# Altium footprint library ESP.PcbLib: 10 footprints
Each footprint in its own frame and in the unit in brackets; x right, y up, seen from the top. Pads: shape width x height; smd on the part's side, far side on the other; paste and mask are expansions set on the pad; w line width, h text height; cw(c..) or ccw(c..) is an arc to the next point about the centre after c.
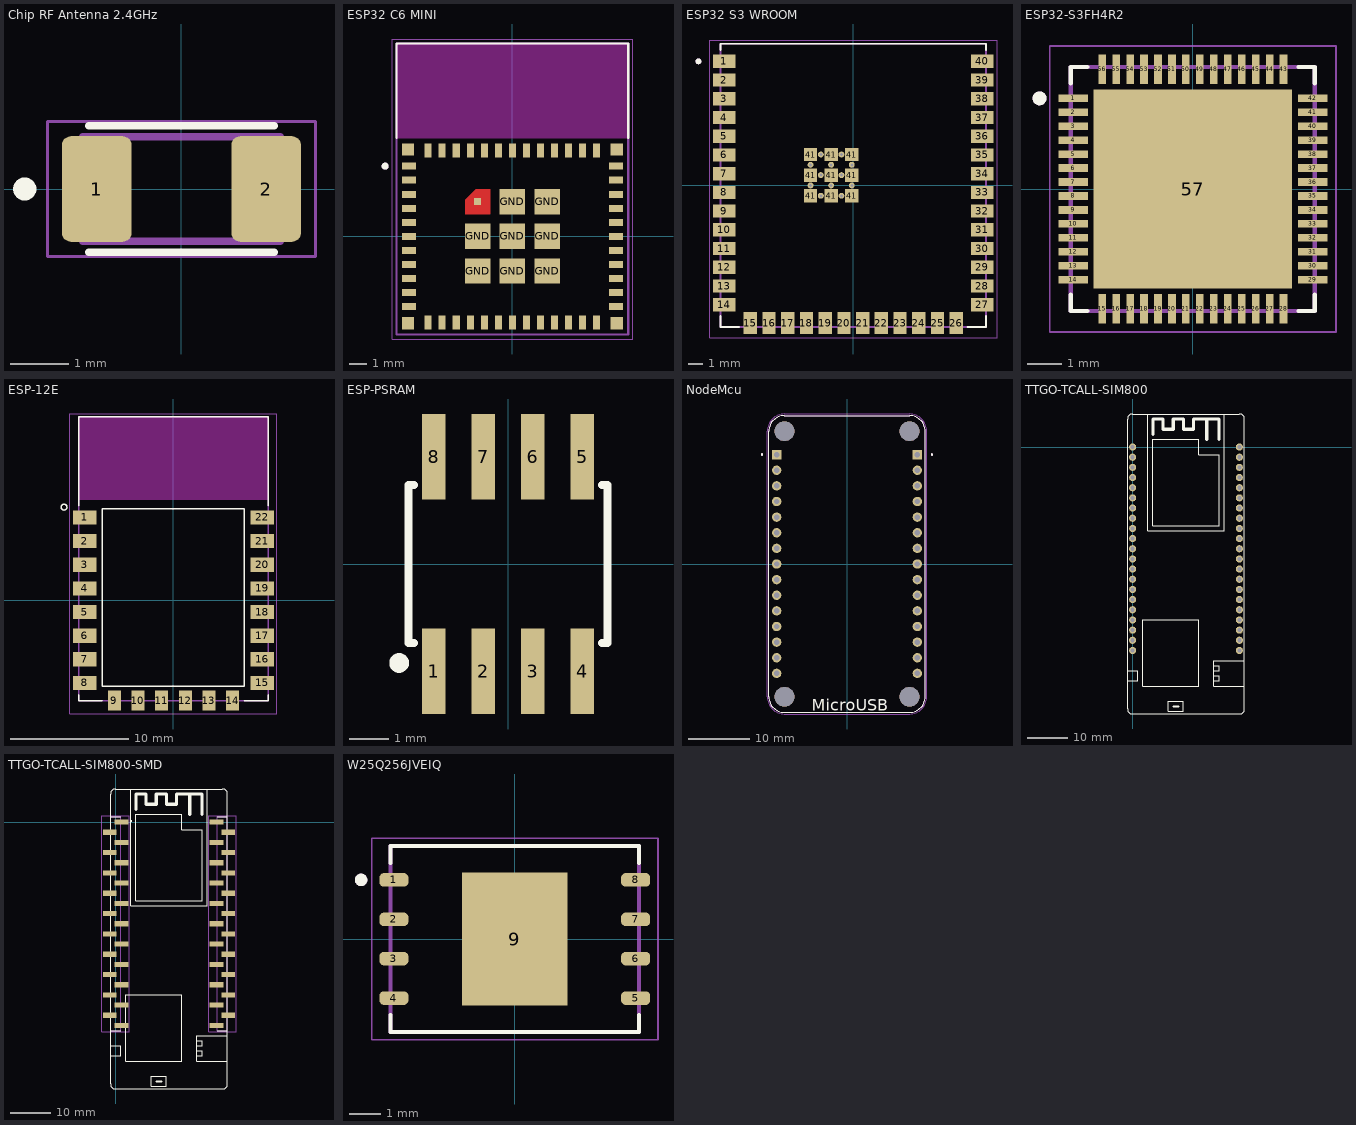
[diagram p0: the footprints below, top view; thin cyan lines are the x and y axes]

## Chip RF Antenna 2.4GHz [mm] "ANTC3216X140N"
pads (2):
  rrect25% 1.2x1.82 smd: 1(-1.46,0) 2(1.46,0)
Top Overlay:
  circle w0.2: c-2.7,0 r0.1
  lines w0.127: -1.6,-1.09 1.6,-1.09 ; -1.6,1.09 1.6,1.09
Mechanical 13:
  lines w0.127: -1.7,-0.9 1.7,-0.9 1.7,0.9 -1.7,0.9 -1.7,-0.9
Mechanical 15:
  lines w0.05: -2.31,-1.16 2.31,-1.16 2.31,1.16 -2.31,1.16 -2.31,-1.16
3D body "step_temp.STEP": height 1.4, standoff 0, extent -1.6,-0.8 1.6,0.8

## ESP32 C6 MINI [mm] "ESP32-C6-MINI-1-N4"
height 2.55
pads (61):
  rect 0.8x0.4 smd: 3(-5.9,2.4) 5(-5.9,0.8) 6(-5.9,0) 8(-5.9,-1.6) 9(-5.9,-2.4) 10(-5.9,-3.2) 25(5.9,-4) 26(5.9,-3.2) 27(5.9,-2.4) 28(5.9,-1.6) 29(5.9,-0.8) 30(5.9,0) 31(5.9,0.8) GND(-5.9,-4) GND(-5.9,3.2) GND(-5.9,4) NC(-5.9,-0.8) NC(-5.9,1.6) NC(5.9,1.6) NC(5.9,2.4) NC(5.9,3.2) NC(5.9,4)
  rect 0.4x0.8 smd: 12(-4.8,-4.9) 13(-4,-4.9) 15(-2.4,-4.9) 16(-1.6,-4.9) 17(-0.8,-4.9) 18(0,-4.9) 19(0.8,-4.9) 20(1.6,-4.9) 22(3.2,-4.9) 23(4,-4.9) 24(4.8,-4.9) GND(-4.8,4.9) GND(-4,4.9) GND(-3.2,-4.9) GND(-3.2,4.9) GND(-2.4,4.9) GND(-1.6,4.9) GND(-0.8,4.9) GND(0,4.9) GND(0.8,4.9) GND(1.6,4.9) GND(2.4,4.9) GND(3.2,4.9) GND(4,4.9) GND(4.8,4.9) NC(2.4,-4.9)
  rect 0.7x0.7 smd: GND(-5.95,-4.95) GND(-5.95,4.95) GND(5.95,-4.95) GND(5.95,4.95)
  rect 1.45x1.45 smd: GND(-1.975,-1.975) GND(-1.975,0) GND(0,-1.975) GND(0,0) GND(0,1.975) GND(1.975,-1.975) GND(1.975,0) GND(1.975,1.975)
  rect 0.4x0.4 smd paste-1 mask+0: GND(-1.975,1.975)
Top Layer:
  region: -1.25,1.25 -2.7,1.25 -2.7,2.1 -2.1,2.7 -1.25,2.7
Top Overlay:
  circle w0.2: c-7.25,4 r0.1
  lines w0.127: -6.6,5.62 -6.6,11 6.6,11 6.6,5.62
Top Paste:
  region: -1.25,1.25 -2.7,1.25 -2.7,2.1 -2.1,2.7 -1.25,2.7
Top Solder:
  region: -1.15,1.15 -2.8,1.15 -2.8,2.15 -2.15,2.8 -1.15,2.8
Keep-Out Layer:
  region: 6.6,5.6 -6.6,5.6 -6.6,11 6.6,11
Mechanical 13:
  circle w0.2: c-7.25,4 r0.1
  lines w0.127: -6.6,-5.6 -6.6,11 6.6,11 6.6,-5.6 -6.6,-5.6
Mechanical 15:
  lines w0.05: -6.85,-5.85 6.85,-5.85 6.85,11.25 -6.85,11.25 -6.85,-5.85
3D body "ESP32-C6-MINI-1-N4.STEP": height 2.55, standoff 0, extent -6.6,-5.597 6.6,11.003

## ESP32 S3 WROOM [mm] "ESP32-S3-WROOM-1U-N4"
height 3.35
pads (61):
  rect 1.5x0.9 smd: 1(-8.75,8.41) 2(-8.75,7.14) 3(-8.75,5.87) 4(-8.75,4.6) 5(-8.75,3.33) 6(-8.75,2.06) 7(-8.75,0.79) 8(-8.75,-0.48) 9(-8.75,-1.75) 10(-8.75,-3.02) 11(-8.75,-4.29) 12(-8.75,-5.56) 13(-8.75,-6.83) 14(-8.75,-8.1) 27(8.75,-8.1) 28(8.75,-6.83) 29(8.75,-5.56) 30(8.75,-4.29) 31(8.75,-3.02) 32(8.75,-1.75) 33(8.75,-0.48) 34(8.75,0.79) 35(8.75,2.06) 36(8.75,3.33) 37(8.75,4.6) 38(8.75,5.87) 39(8.75,7.14) 40(8.75,8.41)
  rect 0.9x1.5 smd: 15(-6.985,-9.35) 16(-5.715,-9.35) 17(-4.445,-9.35) 18(-3.175,-9.35) 19(-1.905,-9.35) 20(-0.635,-9.35) 21(0.635,-9.35) 22(1.905,-9.35) 23(3.175,-9.35) 24(4.445,-9.35) 25(5.715,-9.35) 26(6.985,-9.35)
  rect 0.9x0.9 smd: 41(-2.9,-0.71) 41(-2.9,0.69) 41(-2.9,2.09) 41(-1.5,-0.71) 41(-1.5,0.69) 41(-1.5,2.09) 41(-0.1,-0.71) 41(-0.1,0.69) 41(-0.1,2.09)
  round 0.4 hole 0.2 mask+0: 41(-2.9,-0.01) 41(-2.9,1.39) 41(-2.2,-0.71) 41(-2.2,0.69) 41(-2.2,2.09) 41(-1.5,-0.01) 41(-1.5,1.39) 41(-0.8,-0.71) 41(-0.8,0.69) 41(-0.8,2.09) 41(-0.1,-0.01) 41(-0.1,1.39)
Top Overlay:
  circle w0.2: c-10.5,8.41 r0.1
  lines w0.127: -9,-8.87 -9,-9.6 -7.755,-9.6 ; -9,9.18 -9,9.6 9,9.6 9,9.18 ; 7.755,-9.6 9,-9.6 9,-8.87
Mechanical 13:
  circle w0.2: c-10.5,8.41 r0.1
  lines w0.127: -9,-9.6 -9,9.6 9,9.6 9,-9.6 -9,-9.6
Mechanical 15:
  lines w0.05: -9.75,-10.35 9.75,-10.35 9.75,9.85 -9.75,9.85 -9.75,-10.35
3D body "ESP32-S3-WROOM-1U-N4.STEP": height 3.35, standoff 0, extent -9,-9.6 9,9.6

## ESP32-S3FH4R2 [mm] "QFN40P700X700X90-57N"
height 0.9
pads (57):
  rect 0.84x0.22 smd mask+0.05: 1(-3.435,2.6) 2(-3.435,2.2) 3(-3.435,1.8) 4(-3.435,1.4) 5(-3.435,1) 6(-3.435,0.6) 7(-3.435,0.2) 8(-3.435,-0.2) 9(-3.435,-0.6) 10(-3.435,-1) 11(-3.435,-1.4) 12(-3.435,-1.8) 13(-3.435,-2.2) 14(-3.435,-2.6) 29(3.435,-2.6) 30(3.435,-2.2) 31(3.435,-1.8) 32(3.435,-1.4) 33(3.435,-1) 34(3.435,-0.6) 35(3.435,-0.2) 36(3.435,0.2) 37(3.435,0.6) 38(3.435,1) 39(3.435,1.4) 40(3.435,1.8) 41(3.435,2.2) 42(3.435,2.6)
  rect 0.22x0.84 smd mask+0.05: 15(-2.6,-3.435) 16(-2.2,-3.435) 17(-1.8,-3.435) 18(-1.4,-3.435) 19(-1,-3.435) 20(-0.6,-3.435) 21(-0.2,-3.435) 22(0.2,-3.435) 23(0.6,-3.435) 24(1,-3.435) 25(1.4,-3.435) 26(1.8,-3.435) 27(2.2,-3.435) 28(2.6,-3.435) 43(2.6,3.435) 44(2.2,3.435) 45(1.8,3.435) 46(1.4,3.435) 47(1,3.435) 48(0.6,3.435) 49(0.2,3.435) 50(-0.2,3.435) 51(-0.6,3.435) 52(-1,3.435) 53(-1.4,3.435) 54(-1.8,3.435) 55(-2.2,3.435) 56(-2.6,3.435)
  rect 5.7x5.7 smd paste-4 mask+0.05: 57(0,0)
Top Overlay:
  circle w0.2: c-4.4,2.6 r0.1
  lines w0.127: -3.5,-3.03 -3.5,-3.5 -3.03,-3.5 ; -3.5,3.03 -3.5,3.5 -3.03,3.5 ; 3.03,-3.5 3.5,-3.5 3.5,-3.03 ; 3.03,3.5 3.5,3.5 3.5,3.03
Top Paste:
  region: -0.525,-2.325 -2.325,-2.325 -2.325,-0.525 -0.525,-0.525
  region: 2.325,-2.325 0.525,-2.325 0.525,-0.525 2.325,-0.525
  region: 2.325,0.525 0.525,0.525 0.525,2.325 2.325,2.325
  region: -0.525,0.525 -2.325,0.525 -2.325,2.325 -0.525,2.325
Mechanical 13:
  circle w0.2: c-4.4,2.6 r0.1
  lines w0.127: -3.5,-3.5 3.5,-3.5 3.5,3.5 -3.5,3.5 -3.5,-3.5
Mechanical 15:
  lines w0.05: -4.105,-4.105 -4.105,4.105 4.105,4.105 4.105,-4.105 -4.105,-4.105
3D body "ESP32-S3FH4R2--3DModel-STEP-56544.STEP": height 0.9, standoff 0, extent -3.5,-3.5 3.5,3.5

## ESP-12E [mm] "ESP8266-12E/ESP-12E"
pads (22):
  rect 2x1.2 smd: 1(-7.5,7) 2(-7.5,5) 3(-7.5,3) 4(-7.5,1) 5(-7.5,-1) 6(-7.5,-3) 7(-7.5,-5) 8(-7.5,-7) 15(7.5,-7) 16(7.5,-5) 17(7.5,-3) 18(7.5,-1) 19(7.5,1) 20(7.5,3) 21(7.5,5) 22(7.5,7)
  rect 1.1x1.7 smd: 9(-5,-8.5) 10(-3,-8.5) 11(-1,-8.5) 12(1,-8.5) 13(3,-8.5) 14(5,-8.5)
Top Overlay:
  circle w0.127: c-9.25,7.875 r0.25
  lines w0.127: -8,-8 -8,-8.5 -6,-8.5 ; -8,8 -8,15.5 8,15.5 8,8 ; 6,-8.5 8,-8.5 8,-8 ; -6,-7.26 -6,7.74 6,7.74 6,-7.26 -6,-7.26
Keep-Out Layer:
  region: 8,8.51 -8.009,8.51 -8.009,15.5 8,15.5
  region: 8,8.51 -8.009,8.51 -8.009,15.5 8,15.5
Mechanical 13:
  lines w0.127: -8,-8.5 -8,15.5 8,15.5 8,-8.5 -8,-8.5
Mechanical 15:
  lines w0.05: -8.75,-9.625 -8.75,15.75 8.75,15.75 8.75,-9.625 -8.75,-9.625
3D body "ESP8266-12E.STEP": height 3, standoff 0, extent -8,-8.571 8,15.429

## ESP-PSRAM [mm] "SO08"
pads (8):
  rect 0.6x2.2 smd: 1(-1.905,-2.75) 2(-0.635,-2.75) 3(0.635,-2.75) 4(1.905,-2.75) 5(1.905,2.75) 6(0.635,2.75) 7(-0.635,2.75) 8(-1.905,2.75)
Top Overlay:
  circle w0.254: c-2.794,-2.54 r0.127
  lines w0.203: -2.413,-2.032 -2.557,-2.032 -2.557,-1.243 -2.557,2.032 -2.413,2.032 ; 2.413,-2.032 2.556,-2.032 2.556,-1.244 2.556,2.032 ; 2.413,2.032 2.551,2.032
Mechanical 13:
  region: -1.66,-3.1 -2.15,-3.1 -2.15,-2 -1.66,-2
  region: -0.39,-3.1 -0.88,-3.1 -0.88,-2 -0.39,-2
  region: 0.88,-3.1 0.39,-3.1 0.39,-2 0.88,-2
  region: 2.15,-3.1 1.66,-3.1 1.66,-2 2.15,-2
  region: 2.15,2 1.66,2 1.66,3.1 2.15,3.1
  region: 0.88,2 0.39,2 0.39,3.1 0.88,3.1
  region: -0.39,2 -0.88,2 -0.88,3.1 -0.39,3.1
  region: -1.66,2 -2.15,2 -2.15,3.1 -1.66,3.1
3D body "step_temp.STEP": height 1.75, standoff 0, extent -2.45,-3 2.45,3

## NodeMcu [mil] "NodeMcu"
pads (34):
  rect 60x60 hole 35: J1_1(-450,700) J2_1(450,700)
  round 60 hole 35: J1_2(-450,600) J1_3(-450,500) J1_4(-450,400) J1_5(-450,300) J1_6(-450,200) J1_7(-450,100) J1_8(-450,0) J1_9(-450,-100) J1_10(-450,-200) J1_11(-450,-300) J1_12(-450,-400) J1_13(-450,-500) J1_14(-450,-600) J1_15(-450,-700) J2_2(450,600) J2_3(450,500) J2_4(450,400) J2_5(450,300) J2_6(450,200) J2_7(450,100) J2_8(450,0) J2_9(450,-100) J2_10(450,-200) J2_11(450,-300) J2_12(450,-400) J2_13(450,-500) J2_14(450,-600) J2_15(450,-700)
  round 125.98 hole 125.98 unplated: ""(-400,-850) ""(-400,850) ""(400,-850) ""(400,850)
Top Overlay:
  circle w7.87: c-543.7,700 r3.94
  circle w7.87: c543.7,700 r3.94
  lines w5: -500,-850 ccw(c-400,-850) -400,-950 400,-950 ccw(c400,-850) 500,-850 500,850 ccw(c400,850) 400,950 -400,950 ccw(c-400,850) -500,850 -500,-850
  text "MicroUSB" at -225,-940 h75
Mechanical 13:
  circle w7.87: c-543.7,700 r3.94
  circle w7.87: c543.7,700 r3.94
  lines w5: -500,-850 ccw(c-400,-850) -400,-950 400,-950 ccw(c400,-850) 500,-850 500,850 ccw(c400,850) 400,950 -400,950 ccw(c-400,850) -500,850 -500,-850
Mechanical 15:
  lines w1.97: -509.84,-850 ccw(c-400,-850) -400,-959.84 400,-959.84 ccw(c400,-850) 509.84,-850 509.84,850 ccw(c400,850) 400,959.84 -400,959.84 ccw(c-400,850) -509.84,850 -509.84,-850
3D body "ArduinoNodeMcu.STEP": height 276.59, standoff -235.22, extent -500,-970.47 500,950

## TTGO-TCALL-SIM800 [mm] "TTGO-TCALL-SIM800"
pads (42):
  round 1.8 hole 1.02: 1(0,0) 2(0,-2.54) 3(0,-5.08) 4(0,-7.62) 5(0,-10.16) 6(0,-12.7) 7(0,-15.24) 8(0,-17.78) 9(0,-20.32) 10(0,-22.86) 11(0,-25.4) 12(0,-27.94) 13(0,-30.48) 14(0,-33.02) 15(0,-35.56) 16(0,-38.1) 17(0,-40.64) 18(0,-43.18) 19(0,-45.72) 20(0,-48.26) 21(0,-50.8) 22(26.67,0) 23(26.67,-2.54) 24(26.67,-5.08) 25(26.67,-7.62) 26(26.67,-10.16) 27(26.67,-12.7) 28(26.67,-15.24) 29(26.67,-17.78) 30(26.67,-20.32) 31(26.67,-22.86) 32(26.67,-25.4) 33(26.67,-27.94) 34(26.67,-30.48) 35(26.67,-33.02) 36(26.67,-35.56) 37(26.67,-38.1) 38(26.67,-40.64) 39(26.67,-43.18) 40(26.67,-45.72) 41(26.67,-48.26) 42(26.67,-50.8)
Top Overlay:
  lines w0.12: -1.27,-58.42 1.27,-58.42 1.27,-55.88 -1.27,-55.88 ; 3.81,8.255 3.81,-20.955 22.86,-20.955 22.86,8.255 ; 20.32,-54.61 21.59,-54.61 21.59,-55.88 20.32,-55.88 20.32,-57.15 21.59,-57.15 21.59,-58.42 20.32,-58.42 ; 27.94,-59.69 20.32,-59.69 20.32,-58.42 ; 27.94,-53.34 20.32,-53.34 20.32,-58.42 ; -1.27,-65.405 ccw(c0,-65.405) 0,-66.675 26.67,-66.675 ccw(c26.67,-65.405) 27.94,-65.405 27.94,6.985 ccw(c26.67,6.985) 26.67,8.255 0,8.255 ccw(c0,6.985) -1.27,6.985 -1.27,3.81 -1.27,-50.8 -1.27,-65.405 ; 2.54,-59.69 2.54,-43.18 16.51,-43.18 16.51,-59.69 2.54,-59.69 ; 5.08,-19.685 5.08,1.905 16.51,1.905 16.51,-0.635 16.51,-1.905 21.59,-1.905 21.59,-19.685 5.08,-19.685 ; 8.89,-66.04 8.89,-63.5 12.7,-63.5 12.7,-66.04 8.89,-66.04
  lines w0.5: 10.16,-64.77 11.43,-64.77
  lines w0.8: 5.08,3.175 5.08,6.985 7.62,6.985 7.62,4.445 10.16,4.445 10.16,6.985 12.7,6.985 12.7,4.445 15.24,4.445 15.24,6.985 16.51,6.985 21.59,6.985 21.59,1.905 ; 18.542,1.905 18.542,6.985
3D body "TTGO T-Call.STEP": height 11.99, standoff -2.6, extent -1.226,-66.623 29.474,8.177

## TTGO-TCALL-SIM800-SMD [mm] "TTGO-TCALL-SIM800-SMD"
pads (42):
  rect 3.43x1.27 smd paste+0 mask+0.102: 1(1.46,0) 2(-1.46,-2.54) 3(1.46,-5.08) 4(-1.46,-7.62) 5(1.46,-10.16) 6(-1.46,-12.7) 7(1.46,-15.24) 8(-1.46,-17.78) 9(1.46,-20.32) 10(-1.46,-22.86) 11(1.46,-25.4) 12(-1.46,-27.94) 13(1.46,-30.48) 14(-1.46,-33.02) 15(1.46,-35.56) 16(-1.46,-38.1) 17(1.46,-40.64) 18(-1.46,-43.18) 19(1.46,-45.72) 20(-1.46,-48.26) 21(1.46,-50.8) 22(25.21,0) 23(28.13,-2.54) 24(25.21,-5.08) 25(28.13,-7.62) 26(25.21,-10.16) 27(28.13,-12.7) 28(25.21,-15.24) 29(28.13,-17.78) 30(25.21,-20.32) 31(28.13,-22.86) 32(25.21,-25.4) 33(28.13,-27.94) 34(25.21,-30.48) 35(28.13,-33.02) 36(25.21,-35.56) 37(28.13,-38.1) 38(25.21,-40.64) 39(28.13,-43.18) 40(25.21,-45.72) 41(28.13,-48.26) 42(25.21,-50.8)
Top Overlay:
  circle w0.2: c3.935,0.25 r0.1
  lines w0.12: -1.27,-58.42 1.27,-58.42 1.27,-55.88 -1.27,-55.88 ; 3.81,8.255 3.81,-20.955 22.86,-20.955 22.86,8.255 ; 20.32,-54.61 21.59,-54.61 21.59,-55.88 20.32,-55.88 20.32,-57.15 21.59,-57.15 21.59,-58.42 20.32,-58.42 ; 27.94,-59.69 20.32,-59.69 20.32,-58.42 ; 27.94,-53.34 20.32,-53.34 20.32,-58.42 ; -1.27,-65.405 ccw(c0,-65.405) 0,-66.675 26.67,-66.675 ccw(c26.67,-65.405) 27.94,-65.405 27.94,6.985 ccw(c26.67,6.985) 26.67,8.255 0,8.255 ccw(c0,6.985) -1.27,6.985 -1.27,3.81 -1.27,-50.8 -1.27,-65.405 ; 2.54,-59.69 16.51,-59.69 16.51,-43.18 2.54,-43.18 2.54,-59.69 ; 5.08,-19.685 21.59,-19.685 21.59,-1.905 16.51,-1.905 16.51,-0.635 16.51,1.905 5.08,1.905 5.08,-19.685 ; 8.89,-66.04 12.7,-66.04 12.7,-63.5 8.89,-63.5 8.89,-66.04
  lines w0.2: -1.27,-49.53 -1.27,-52.07 1.27,-52.07 ; -1.27,-1.27 -1.27,1.27 1.27,1.27 ; 25.4,-52.07 27.94,-52.07 27.94,-49.53 ; 25.4,1.27 27.94,1.27 27.94,-1.27
  lines w0.5: 10.16,-64.77 11.43,-64.77
  lines w0.8: 5.08,3.175 5.08,6.985 7.62,6.985 7.62,4.445 10.16,4.445 10.16,6.985 12.7,6.985 12.7,4.445 15.24,4.445 15.24,6.985 16.51,6.985 21.59,6.985 21.59,1.905 ; 18.542,1.905 18.542,6.985
Mechanical 13:
  circle w0.2: c3.935,0.25 r0.1
  lines w0.1: -1.27,-52.07 -1.27,1.27 1.27,1.27 1.27,-52.07 -1.27,-52.07 ; 25.4,-52.07 25.4,1.27 27.94,1.27 27.94,-52.07 25.4,-52.07
Mechanical 15:
  lines w0.05: -3.425,-52.32 -3.425,1.52 3.425,1.52 3.425,-52.32 -3.425,-52.32 ; 23.245,-52.32 23.245,1.52 30.095,1.52 30.095,-52.32 23.245,-52.32
3D body "TTGO T-Call.STEP": height 14.61, standoff 0.02, extent -1.226,-66.623 29.474,8.177

## W25Q256JVEIQ [mm] "SON127P600X800X80-9N"
height 0.8
pads (9):
  rrect70% 0.94x0.44 smd: 1(-3.895,1.905) 2(-3.895,0.635) 3(-3.895,-0.635) 4(-3.895,-1.905) 5(3.895,-1.905) 6(3.895,-0.635) 7(3.895,0.635) 8(3.895,1.905)
  rect 3.4x4.3 smd paste-3: 9(0,0)
Top Overlay:
  circle w0.2: c-4.953,1.905 r0.1
  lines w0.127: -4,-2.445 -4,-3 4,-3 4,-2.445 ; -4,2.445 -4,3 4,3 4,2.445
Top Paste:
  region: 1.075,-1.36 -1.075,-1.36 -1.075,1.36 1.075,1.36
Mechanical 13:
  circle w0.2: c-4.953,1.905 r0.1
  lines w0.127: -4,-3 4,-3 4,3 -4,3 -4,-3
Mechanical 15:
  lines w0.05: -4.615,-3.25 -4.615,3.25 4.615,3.25 4.615,-3.25 -4.615,-3.25
3D body "step_temp.STEP": height 0.8, standoff 0, extent -4,-3 4,3